# Altium schematic symbol library Robert_.SchLib: 177 symbols (part 2 of 6)
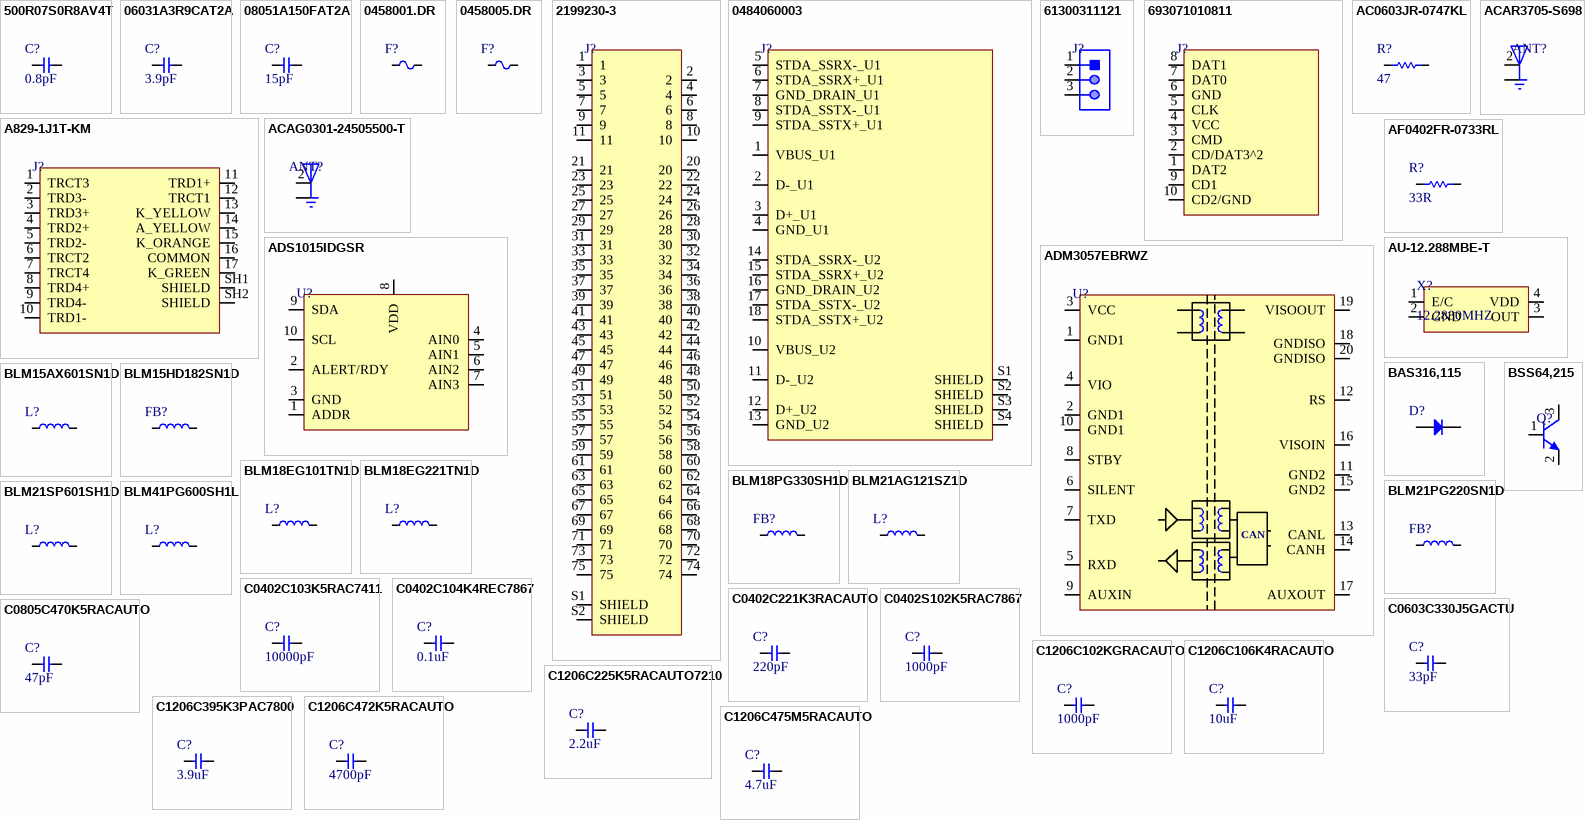
[diagram p7: symbols 500R07S0R8AV4T to C1206C475M5RACAUTO]

## C1206C106K4RACAUTO
designator C?, comment 10uF
CAP CER 10UF 16V X7R 1206; Manufacturer: KEMET; Manufacturer Part Number: C1206C106K4RACAUTO; Supplier: Mouser; Supplier Part Number: 80-C1206C106K4RAUTO; RoHS: Yes; Category: Ceramic Capacitors; Stock: 96894; Pricing: 1=0.45, 10=0.218, 50=0.218, 100=0.141, 1000=0.119, 10000=0.096 (USD); ComponentLink1URL: https://datasheet.ciiva.com/5969/1776110-5969442.pdf?src-supplier=Farnell; ComponentLink1Description: https://datasheet.ciiva.com/5969/1776110-5969442.pdf?src-supplier=Farnell; ComponentLink2URL: https://datasheet.ciiva.com/7729/1776110-7729820.pdf?src-supplier=Element14; ComponentLink2Description: https://datasheet.ciiva.com/7729/1776110-7729820.pdf?src-supplier=Element14; ComponentLink3URL: https://datasheet.ciiva.com/22704/1776110-22704890.pdf?src-supplier=Element14; ComponentLink3Description: https://datasheet.ciiva.com/22704/1776110-22704890.pdf?src-supplier=Element14
footprint Cap-1206 (SMD 1206)
pins: 1, 2

## C1206C225K5RACAUTO7210
designator C?, comment 2.2uF
CAP CER 2.2UF 50V X7R 1206; Manufacturer: KEMET; Manufacturer Part Number: C1206C225K5RACAUTO7210; Supplier: Mouser; Supplier Part Number: 80-C1206C225K5RAUTLR; RoHS: Yes; Category: Ceramic Capacitors; Stock: 62340; Pricing: 1=0.34, 10=0.231, 50=0.231, 100=0.131, 1000=0.081, 10000=0.063 (USD); ComponentLink1URL: https://api.kemet.com/component-edge/download/datasheet/C1206C225K5RACAUTO7210.pdf?src-supplier=Digi-Key; ComponentLink1Description: https://api.kemet.com/component-edge/download/datasheet/C1206C225K5RACAUTO7210.pdf?src-supplier=Digi-Key; ComponentLink2URL: https://datasheet.octopart.com/C1206C225K5RACAUTO7210-KEMET-datasheet-149525492.pdf?src-supplier=Farnell; ComponentLink2Description: https://datasheet.octopart.com/C1206C225K5RACAUTO7210-KEMET-datasheet-149525492.pdf?src-supplier=Farnell
footprint Cap-1206 (SMD 1206)
pins: 1, 2

## C1206C395K3PAC7800
designator C?, comment 3.9uF
CAP CER 3.9UF 25V X5R 1206; Manufacturer: KEMET; Manufacturer Part Number: C1206C395K3PAC7800; Supplier: Digi-Key; Supplier Part Number: 399-C1206C395K3PAC7800CT-ND; RoHS: Yes; Category: Ceramic Capacitors; Stock: 4449; Pricing: 1=0.72, 10=0.532, 50=0.4252, 100=0.3645, 500=0.28856, 1000=0.243 (USD)
footprint Cap-1206 (SMD 1206)
pins: 1, 2

## C1206C472K5RACAUTO
designator C?, comment 4700pF
CAP CER 4700PF 50V X7R 1206; Manufacturer: KEMET; Manufacturer Part Number: C1206C472K5RACAUTO; Supplier: Mouser; Supplier Part Number: 80-C1206C472K5RAUTO; RoHS: Yes; Category: Ceramic Capacitors; Stock: 3869; Pricing: 1=0.18, 10=0.075, 50=0.075, 100=0.044, 1000=0.036, 10000=0.028 (USD); ComponentLink1URL: https://datasheet.ciiva.com/6259/datasheetpn-c1206c472k5racauto-6259849.pdf?src-supplier=Digi-Key; ComponentLink1Description: https://datasheet.ciiva.com/6259/datasheetpn-c1206c472k5racauto-6259849.pdf?src-supplier=Digi-Key
footprint Cap-1206 (SMD 1206)
pins: 1, 2

## C1206C475M5RACAUTO
designator C?, comment 4.7uF
CAP CER 4.7UF 50V X7R 1206; Manufacturer: KEMET; Manufacturer Part Number: C1206C475M5RACAUTO; Supplier: Mouser; Supplier Part Number: 80-C1206C475M5RAUTO; RoHS: Yes; Category: Ceramic Capacitors; Stock: 75276; Pricing: 1=0.63, 10=0.443, 50=0.443, 100=0.292, 1000=0.204, 10000=0.149 (USD)
footprint Cap-1206 (SMD 1206)
pins: 1, 2

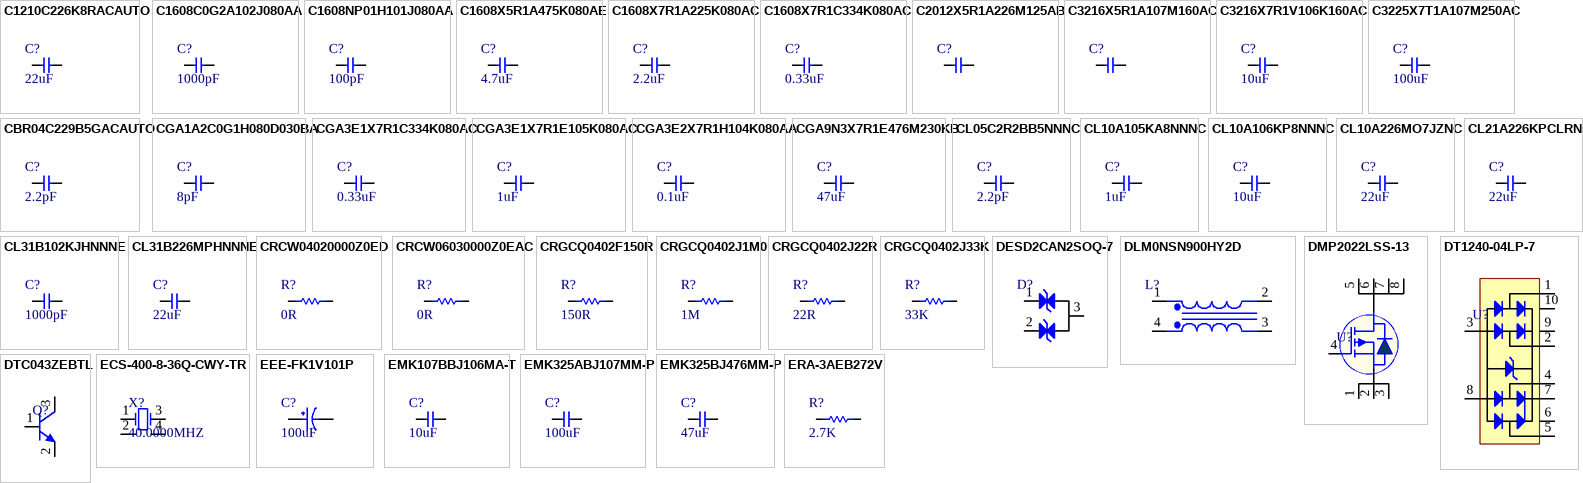
[diagram p1: symbols C1210C226K8RACAUTO to ERA-3AEB272V]

## C1210C226K8RACAUTO
designator C?, comment 22uF
CAP CER 22UF 10V X7R 1210; Manufacturer: KEMET; Manufacturer Part Number: C1210C226K8RACAUTO; Supplier: Mouser; Supplier Part Number: 80-C1210C226K8RAUTO; RoHS: Yes; Category: Ceramic Capacitors; Stock: 25152; Pricing: 1=1.03, 10=0.631, 50=0.631, 100=0.618, 1000=0.412, 10000=0.357 (USD); ComponentLink1URL: http://www.farnell.com/datasheets/2746889.pdf?src-supplier=Farnell; ComponentLink1Description: http://www.farnell.com/datasheets/2746889.pdf?src-supplier=Farnell; ComponentLink2URL: https://datasheet.octopart.com/C1210C226K8RACAUTO-KEMET-datasheet-102159698.pdf?src-supplier=Newark; ComponentLink2Description: https://datasheet.octopart.com/C1210C226K8RACAUTO-KEMET-datasheet-102159698.pdf?src-supplier=Newark; ComponentLink3URL: http://www.farnell.com/datasheets/2746889.pdf?src-supplier=Element14; ComponentLink3Description: http://www.farnell.com/datasheets/2746889.pdf?src-supplier=Element14; ComponentLink4URL: http://www.farnell.com/datasheets/2746889.pdf?src-supplier=Newark; ComponentLink4Description: http://www.farnell.com/datasheets/2746889.pdf?src-supplier=Newark; ComponentLink5URL: https://datasheet.octopart.com/C1210C226K8RACAUTO-KEMET-datasheet-149526349.pdf?src-supplier=Farnell; ComponentLink5Description: https://datasheet.octopart.com/C1210C226K8RACAUTO-KEMET-datasheet-149526349.pdf?src-supplier=Farnell; ComponentLink6URL: https://api.kemet.com/component-edge/download/datasheet/C1210C226K8RACAUTO.pdf?src-supplier=Digi-Key; ComponentLink6Description: https://api.kemet.com/component-edge/download/datasheet/C1210C226K8RACAUTO.pdf?src-supplier=Digi-Key; ComponentLink7URL: http://capacitoredge.kemet.com/capedge2/DataSheet?pn=C1210C226K8RACAUTO&src-supplier=Avnet; ComponentLink7Description: http://capacitoredge.kemet.com/capedge2/DataSheet?pn=C1210C226K8RACAUTO&src-supplier=Avnet; ComponentLink8URL: https://datasheet.octopart.com/C1210C226K8RACAUTO-KEMET-datasheet-130347614.pdf?src-supplier=TME; ComponentLink8Description: https://datasheet.octopart.com/C1210C226K8RACAUTO-KEMET-datasheet-130347614.pdf?src-supplier=TME
footprint Cap-1210 (SMD 1210)
pins: 1, 2

## C1608C0G2A102J080AA
designator C?, comment 1000pF
CAP CER 1000PF 100V C0G 0603; Manufacturer: TDK; Manufacturer Part Number: C1608C0G2A102J080AA; Item Type: Capacitor; Supplier: Rs; Supplier Part Number: 9040183; RoHS: Yes; Category: Ceramic Capacitors; Stock: 300; Pricing: 100=0.033, 500=0.031, 1000=0.029, 2500=0.028, 5000=0.025 (GBP); ComponentLink1URL: https://datasheet.ciiva.com/24217/c1608c0g2a102j080aa-264625-24217039.pdf?src-supplier=Mouser; ComponentLink1Description: https://datasheet.ciiva.com/24217/c1608c0g2a102j080aa-264625-24217039.pdf?src-supplier=Mouser; ComponentLink2URL: https://datasheet.ciiva.com/16498/mid-volt-b11-16498805.pdf?src-supplier=Future+Electronics; ComponentLink2Description: https://datasheet.ciiva.com/16498/mid-volt-b11-16498805.pdf?src-supplier=Future+Electronics
footprint Cap-0603
pins: 1, 2

## C1608NP01H101J080AA
designator C?, comment 100pF
CAP CER 100PF 50V NP0 0603; Manufacturer: TDK; Manufacturer Part Number: C1608NP01H101J080AA; Item Type: Capacitor; Supplier: Arrow Electronics; Supplier Part Number: C1608NP01H101J080AA; RoHS: Yes; Category: Ceramic Capacitors; Stock: 1236; Pricing: 1=0.1172, 10=0.0734, 25=0.0727, 50=0.0628, 100=0.0474, 250=0.0469, 500=0.0388, 1000=0.0313 (USD); ComponentLink1URL: http://www.mouser.com/ds/2/400/tdk_mlcc_commercial_general_en-542463.pdf?src-supplier=Mouser; ComponentLink1Description: http://www.mouser.com/ds/2/400/tdk_mlcc_commercial_general_en-542463.pdf?src-supplier=Mouser; ComponentLink2URL: https://datasheet.octopart.com/C1608NP01H101J080AA-TDK-datasheet-43914282.pdf?src-supplier=Future+Electronics; ComponentLink2Description: https://datasheet.octopart.com/C1608NP01H101J080AA-TDK-datasheet-43914282.pdf?src-supplier=Future+Electronics; ComponentLink3URL: https://product.tdk.com/info/en/catalog/datasheets/mlcc_commercial_hightemp_en.pdf?ref_disty=digikey&src-supplier=Digi-Key; ComponentLink3Description: https://product.tdk.com/info/en/catalog/datasheets/mlcc_commercial_hightemp_en.pdf?ref_disty=digikey&src-supplier=Digi-Key; ComponentLink4URL: https://product.tdk.com/info/en/documents/chara_sheet/C1608NP01H101J080AA.pdf?src-supplier=Digi-Key; ComponentLink4Description: https://product.tdk.com/info/en/documents/chara_sheet/C1608NP01H101J080AA.pdf?src-supplier=Digi-Key; ComponentLink5URL: http://product.tdk.com/en/catalog/datasheets/mlcc_commercial_hightemp_en.pdf?src-supplier=Avnet; ComponentLink5Description: http://product.tdk.com/en/catalog/datasheets/mlcc_commercial_hightemp_en.pdf?src-supplier=Avnet
footprint Cap-0603
pins: 1, 2

## C1608X5R1A475K080AE
designator C?, comment 4.7uF
CAP CER 4.7UF 10V X5R 0603; Manufacturer: TDK; Manufacturer Part Number: C1608X5R1A475K080AE; Item Type: Capacitor; Supplier: Arrow Electronics; Supplier Part Number: C1608X5R1A475K080AE; RoHS: Yes; Category: Ceramic Capacitors; Stock: 1894; Pricing: 1=0.1954, 10=0.1074, 25=0.1063, 50=0.1053, 100=0.0737, 250=0.073, 500=0.0723, 1000=0.0631 (USD); ComponentLink1URL: https://product.tdk.com/info/en/catalog/datasheets/mlcc_commercial_soft_en.pdf?src-supplier=Digi-Key; ComponentLink1Description: https://product.tdk.com/info/en/catalog/datasheets/mlcc_commercial_soft_en.pdf?src-supplier=Digi-Key; ComponentLink2URL: https://product.tdk.com/info/en/catalog/datasheets/mlcc_commercial_soft_en.pdf?ref_disty=digikey&src-supplier=Digi-Key; ComponentLink2Description: https://product.tdk.com/info/en/catalog/datasheets/mlcc_commercial_soft_en.pdf?ref_disty=digikey&src-supplier=Digi-Key; ComponentLink3URL: https://product.tdk.com/info/en/catalog/spec/mlccspec_commercial_soft_en.pdf?src-supplier=Digi-Key; ComponentLink3Description: https://product.tdk.com/info/en/catalog/spec/mlccspec_commercial_soft_en.pdf?src-supplier=Digi-Key; ComponentLink4URL: https://datasheet.octopart.com/C1608X5R1A475K080AE-TDK-datasheet-60278151.pdf?src-supplier=Future+Electronics; ComponentLink4Description: https://datasheet.octopart.com/C1608X5R1A475K080AE-TDK-datasheet-60278151.pdf?src-supplier=Future+Electronics; ComponentLink5URL: https://datasheet.octopart.com/C1608X5R1A475K080AE-TDK-datasheet-159617022.pdf?src-supplier=TME; ComponentLink5Description: https://datasheet.octopart.com/C1608X5R1A475K080AE-TDK-datasheet-159617022.pdf?src-supplier=TME
footprint Cap-0603
pins: 1, 2

## C1608X7R1A225K080AC
designator C?, comment 2.2uF
CAP CER 2.2UF 10V X7R 0603; Manufacturer: TDK; Manufacturer Part Number: C1608X7R1A225K080AC; Dielectric Material: Ceramic; Tolerance: 10%; Item type: Capacitor; Supplier: Rs; Supplier Part Number: 9040237; RoHS: Yes; Category: Ceramic Capacitors; Stock: 4700; Pricing: 50=0.061, 250=0.052, 500=0.043, 1000=0.04, 2000=0.036 (GBP); Mounting Technology: Surface Mount; Case/Package: 0603; Case Code (Metric): 1608; Case Code (Imperial): 0603; Weight: 7.1E-05oz; Min Operating Temperature: -55°C; Max Operating Temperature: 125°C; Packaging: Tape and Reel; Value: 2.2uF; Dielectric: X7R; Construction: Flat; Voltage Rating: 10V; Voltage Rating (DC): 10V; Series: C; Package Quantity: 4000; Termination: SMD/SMT; Length: 1.6mm; Width: 0.8mm; Height: 0.8mm; Depth: 0.8mm; Lead Free: Lead Free; Reach SVHC Compliant: No; RoHS Compliant: Yes; ComponentLink1URL: https://datasheet.ciiva.com/24216/c1608x7r1a225k080ac-264808-24216485.pdf?src-supplier=Mouser; ComponentLink1Description: https://datasheet.ciiva.com/24216/c1608x7r1a225k080ac-264808-24216485.pdf?src-supplier=Mouser; ComponentLink2URL: https://datasheet.ciiva.com/22718/1796654-22718012.pdf?src-supplier=Element14; ComponentLink2Description: https://datasheet.ciiva.com/22718/1796654-22718012.pdf?src-supplier=Element14; ComponentLink3URL: https://datasheet.ciiva.com/6290/tdkmlcccaprange-6290821.pdf?src-supplier=Digi-Key; ComponentLink3Description: https://datasheet.ciiva.com/6290/tdkmlcccaprange-6290821.pdf?src-supplier=Digi-Key; ComponentLink4URL: https://datasheet.ciiva.com/6290/tdkmlcccaprange-6290824.pdf?src-supplier=Digi-Key; ComponentLink4Description: https://datasheet.ciiva.com/6290/tdkmlcccaprange-6290824.pdf?src-supplier=Digi-Key; ComponentLink5URL: https://datasheet.ciiva.com/23802/1796654-23802775.pdf?src-supplier=Newark; ComponentLink5Description: https://datasheet.ciiva.com/23802/1796654-23802775.pdf?src-supplier=Newark; ComponentLink6URL: https://datasheet.ciiva.com/28451/1796654-28451240.pdf?src-supplier=Element14; ComponentLink6Description: https://datasheet.ciiva.com/28451/1796654-28451240.pdf?src-supplier=Element14; ComponentLink7URL: https://datasheet.ciiva.com/22725/1913358-22725529.pdf?src-supplier=Element14; ComponentLink7Description: https://datasheet.ciiva.com/22725/1913358-22725529.pdf?src-supplier=Element14
footprint Cap-0603
pins: 1, 2

## C1608X7R1C334K080AC
designator C?, comment 0.33uF
CAP CER 0.33UF 16V X7R 0603; Manufacturer: TDK; Manufacturer Part Number: C1608X7R1C334K080AC; Item Type: Capacitor; Supplier: Future Electronics; Supplier Part Number: 6011009; RoHS: Yes; Category: Ceramic Capacitors; Stock: 8000; Pricing: 4000=0.014, 12000=0.0135, 40000=0.013, 80000=0.0127, 160000=0.0122 (USD); ComponentLink1URL: https://datasheet.ciiva.com/26834/getdatasheetpartid-746282-26834377.pdf?src-supplier=Verical; ComponentLink1Description: https://datasheet.ciiva.com/26834/getdatasheetpartid-746282-26834377.pdf?src-supplier=Verical; ComponentLink2URL: https://datasheet.ciiva.com/16493/general-b11-16493759.pdf?src-supplier=Future+Electronics; ComponentLink2Description: https://datasheet.ciiva.com/16493/general-b11-16493759.pdf?src-supplier=Future+Electronics; ComponentLink3URL: https://datasheet.ciiva.com/28451/1796654-28451272.pdf?src-supplier=Element14; ComponentLink3Description: https://datasheet.ciiva.com/28451/1796654-28451272.pdf?src-supplier=Element14; ComponentLink4URL: https://datasheet.ciiva.com/22718/1796654-22718014.pdf?src-supplier=Element14; ComponentLink4Description: https://datasheet.ciiva.com/22718/1796654-22718014.pdf?src-supplier=Element14; ComponentLink5URL: https://datasheet.ciiva.com/6292/tdkmlcccaprange-6292475.pdf?src-supplier=Digi-Key; ComponentLink5Description: https://datasheet.ciiva.com/6292/tdkmlcccaprange-6292475.pdf?src-supplier=Digi-Key; ComponentLink6URL: https://datasheet.ciiva.com/6292/tdkmlcccaprange-6292477.pdf?src-supplier=Digi-Key; ComponentLink6Description: https://datasheet.ciiva.com/6292/tdkmlcccaprange-6292477.pdf?src-supplier=Digi-Key; ComponentLink7URL: https://datasheet.ciiva.com/6292/tdkmlcccaprange-6292479.pdf?src-supplier=Digi-Key; ComponentLink7Description: https://datasheet.ciiva.com/6292/tdkmlcccaprange-6292479.pdf?src-supplier=Digi-Key
footprint Cap-0603
pins: 1, 2

## C2012X5R1A226M125AB
designator C?
CAP CER 22UF 10V X5R 0805; Manufacturer: TDK; Manufacturer Part Number: C2012X5R1A226M125AB; Dielectric Material: Ceramic; Tolerance: 20%; Item Type: Capacitor; Supplier: Rs; Supplier Part Number: 9159265; RoHS: Yes; Category: Ceramic Capacitors; Stock: 2720; Pricing: 20=0.186, 100=0.121, 200=0.112, 500=0.103, 1000=0.093 (GBP); Mounting Technology: Surface Mount; Case/Package: 0805; Pins: 2; Case Code (Metric): 2012; Case Code (Imperial): 0805; Weight: 0.000194oz; Min Operating Temperature: -55°C; Max Operating Temperature: 85°C; Voltage Rating (DC): 10V; Packaging: Tape and Reel; Value: 22uF; Dielectric: X5R; Construction: Flat; Package Quantity: 1; Voltage Rating: 10V; Termination: SMD/SMT; Series: C; Length: 2mm; Width: 0.049inch; Height: 1.25mm; Depth: 1.25mm; Thickness: 0.057inch; Lead Free: Lead Free; RoHS Compliant: Yes; Reach SVHC Compliant: Unknown; ComponentLink1URL: https://datasheet.ciiva.com/24216/c2012x5r1a226m125ab-264884-24216051.pdf?src-supplier=Mouser; ComponentLink1Description: https://datasheet.ciiva.com/24216/c2012x5r1a226m125ab-264884-24216051.pdf?src-supplier=Mouser; ComponentLink2URL: https://datasheet.ciiva.com/6287/tdkmlcccaprange-6287852.pdf?src-supplier=Digi-Key; ComponentLink2Description: https://datasheet.ciiva.com/6287/tdkmlcccaprange-6287852.pdf?src-supplier=Digi-Key; ComponentLink3URL: https://datasheet.ciiva.com/6287/tdkmlcccaprange-6287847.pdf?src-supplier=Digi-Key; ComponentLink3Description: https://datasheet.ciiva.com/6287/tdkmlcccaprange-6287847.pdf?src-supplier=Digi-Key; ComponentLink4URL: https://datasheet.ciiva.com/23803/1796654-23803018.pdf?src-supplier=Newark; ComponentLink4Description: https://datasheet.ciiva.com/23803/1796654-23803018.pdf?src-supplier=Newark; ComponentLink5URL: https://datasheet.ciiva.com/16384/general-b11-16384554.pdf?src-supplier=Future+Electronics; ComponentLink5Description: https://datasheet.ciiva.com/16384/general-b11-16384554.pdf?src-supplier=Future+Electronics
footprint Cap-0805 (SMD 0805)
pins: 1, 2

## C3216X5R1A107M160AC
designator C?
CAP CER 100UF 10V X5R 1206; Manufacturer: TDK; Manufacturer Part Number: C3216X5R1A107M160AC; Dielectric Material: Ceramic; Tolerance: 20%; Item Type: Capacitor; Supplier: Rs; Supplier Part Number: 7883057P; RoHS: Yes; Category: Ceramic Capacitors; Stock: 81920; Pricing: 50=0.708, 100=0.656, 250=0.606, 500=0.556 (GBP); Mounting Technology: Surface Mount; Case/Package: 1206; Case Code (Imperial): 1206; Case Code (Metric): 3216; Weight: 0.000571oz; Min Operating Temperature: -55°C; Max Operating Temperature: 85°C; Value: 100uF; Voltage Rating: 10V; Voltage Rating (DC): 10V; Packaging: Tape and Reel; Package Quantity: 1; Dielectric: X5R; Termination: SMD/SMT; Voltage: 10V; Series: C; Construction: Flat; Length: 3.2mm; Width: 0.063inch; Height: 1.6mm; Thickness: 0.075inch; Depth: 1.6mm; Reach SVHC Compliant: No; Lead Free: Lead Free; RoHS Compliant: Yes; ComponentLink1URL: https://datasheet.ciiva.com/24216/c3216x5r1a107m160ac-265050-24216592.pdf?src-supplier=Mouser; ComponentLink1Description: https://datasheet.ciiva.com/24216/c3216x5r1a107m160ac-265050-24216592.pdf?src-supplier=Mouser; ComponentLink2URL: https://datasheet.ciiva.com/7975/1796654-7975125.pdf?src-supplier=Element14; ComponentLink2Description: https://datasheet.ciiva.com/7975/1796654-7975125.pdf?src-supplier=Element14; ComponentLink3URL: https://datasheet.ciiva.com/22694/1796654-22694157.pdf?src-supplier=Element14; ComponentLink3Description: https://datasheet.ciiva.com/22694/1796654-22694157.pdf?src-supplier=Element14; ComponentLink4URL: https://datasheet.ciiva.com/22725/1913358-22725579.pdf?src-supplier=Element14; ComponentLink4Description: https://datasheet.ciiva.com/22725/1913358-22725579.pdf?src-supplier=Element14; ComponentLink5URL: https://datasheet.ciiva.com/28620/mlcc-commercial-general-en-28620362.pdf?src-supplier=Element14; ComponentLink5Description: https://datasheet.ciiva.com/28620/mlcc-commercial-general-en-28620362.pdf?src-supplier=Element14; ComponentLink6URL: https://datasheet.ciiva.com/6284/tdkmlcccaprange-6284586.pdf?src-supplier=Digi-Key; ComponentLink6Description: https://datasheet.ciiva.com/6284/tdkmlcccaprange-6284586.pdf?src-supplier=Digi-Key; ComponentLink7URL: https://datasheet.ciiva.com/6284/tdkmlcccaprange-6284584.pdf?src-supplier=Digi-Key; ComponentLink7Description: https://datasheet.ciiva.com/6284/tdkmlcccaprange-6284584.pdf?src-supplier=Digi-Key; ComponentLink8URL: https://datasheet.ciiva.com/6284/tdkmlcccaprange-6284588.pdf?src-supplier=Digi-Key; ComponentLink8Description: https://datasheet.ciiva.com/6284/tdkmlcccaprange-6284588.pdf?src-supplier=Digi-Key; ComponentLink9URL: https://datasheet.ciiva.com/16482/e412-c-16482549.pdf?src-supplier=Future+Electronics; ComponentLink9Description: https://datasheet.ciiva.com/16482/e412-c-16482549.pdf?src-supplier=Future+Electronics; ComponentLink10URL: https://datasheet.ciiva.com/48671/e412-c-48671366.pdf?src-supplier=Avnet; ComponentLink10Description: https://datasheet.ciiva.com/48671/e412-c-48671366.pdf?src-supplier=Avnet
footprint Cap-1206 (SMD 1206)
pins: 1, 2

## C3216X7R1V106K160AC
designator C?, comment 10uF
CAP CER 10UF 35V X7R 1206; Manufacturer: TDK; Manufacturer Part Number: C3216X7R1V106K160AC; Item Type: Capacitor; Supplier: Rs; Supplier Part Number: 9162964; RoHS: Yes; Category: Ceramic Capacitors; Stock: 40; Pricing: 10=0.37, 100=0.324, 250=0.278, 500=0.231, 1000=0.185 (GBP); ComponentLink1URL: https://datasheet.ciiva.com/14905/tdkmlcccaprange-14905260.pdf?src-supplier=Digi-Key; ComponentLink1Description: https://datasheet.ciiva.com/14905/tdkmlcccaprange-14905260.pdf?src-supplier=Digi-Key; ComponentLink2URL: https://datasheet.ciiva.com/14905/tdkmlcccaprange-14905261.pdf?src-supplier=Digi-Key; ComponentLink2Description: https://datasheet.ciiva.com/14905/tdkmlcccaprange-14905261.pdf?src-supplier=Digi-Key; ComponentLink3URL: https://datasheet.ciiva.com/14905/tdkmlcccaprange-14905263.pdf?src-supplier=Digi-Key; ComponentLink3Description: https://datasheet.ciiva.com/14905/tdkmlcccaprange-14905263.pdf?src-supplier=Digi-Key
footprint Cap-1206 (SMD 1206)
pins: 1, 2

## C3225X7T1A107M250AC
designator C?, comment 100uF
CAP CER 100UF 10V X7T 1210; Manufacturer: TDK; Manufacturer Part Number: C3225X7T1A107M250AC; Supplier: Digi-Key; Supplier Part Number: 445-C3225X7T1A107M250ACCT-ND; RoHS: Yes; Category: Ceramic Capacitors; Stock: 654; Pricing: 1=1.75, 10=1.385, 50=1.2004, 100=1.0388, 500=0.78484 (USD)
footprint Cap-1210 (SMD 1210)
pins: 1, 2

## CBR04C229B5GACAUTO
designator C?, comment 2.2pF
CAP CER 2.2PF 50V C0G/NP0 0402; Manufacturer: KEMET; Manufacturer Part Number: CBR04C229B5GACAUTO; Supplier: Mouser; Supplier Part Number: 80-CBR04C229B5GAUTO; RoHS: No; Stock: 8250; Pricing: 1=0.16, 10=0.066, 50=0.066, 100=0.039, 1000=0.034, 10000=0.026 (USD)
footprint Cap-0402
pins: 1, 2

## CGA1A2C0G1H080D030BA
designator C?, comment 8pF
CAP CER 8PF 50V C0G 0201; Manufacturer: TDK; Manufacturer Part Number: CGA1A2C0G1H080D030BA; Material: 4241ConductorMaterial; Temperature Coefficient: 30ppm/°C; Supplier: Digi-Key; Supplier Part Number: 445-12057-1-ND; RoHS: Yes; Category: Ceramic Capacitors; Stock: 40913; Pricing: 1=0.11, 10=0.078, 50=0.0424, 100=0.0346, 500=0.02474, 1000=0.01944, 2500=0.01768, 5000=0.01626 (USD); Mounting Technology: Surface Mount; Case/Package: 0201; Case Code (Metric): 0603; Case Code (Imperial): 0201; Weight: 6E-06oz; Min Operating Temperature: -55°C; Max Operating Temperature: 125°C; Package Quantity: 15000; Packaging: Tape and Reel; Value: 8pF; Voltage Rating: 50V; Voltage Rating (DC): 50V; Dielectric: C0G; Termination: SMD/SMT; Series: CGA; Length: 0.6mm; Width: 0.3mm; Height: 0.3mm; Ratings: AEC-Q200; RoHS Compliant: Yes; ComponentLink1URL: https://datasheet.ciiva.com/24221/mlcc-automotive-general-en-24221484.pdf?src-supplier=Mouser; ComponentLink1Description: https://datasheet.ciiva.com/24221/mlcc-automotive-general-en-24221484.pdf?src-supplier=Mouser
footprint CAP-0201
pins: 1, 2

## CGA3E1X7R1C334K080AC
designator C?, comment 0.33uF
CAP CER 0.33UF 16V X7R 0603; Manufacturer: TDK; Manufacturer Part Number: CGA3E1X7R1C334K080AC; Material: 4241ConductorMaterial; Supplier: Avnet; Supplier Part Number: 52W9636; RoHS: Yes; Category: Ceramic Capacitors; Stock: 4000; Pricing: 1=0.023 (USD); ComponentLink1URL: https://datasheet.ciiva.com/26834/getdatasheetpartid-734961-26834531.pdf?src-supplier=Verical; ComponentLink1Description: https://datasheet.ciiva.com/26834/getdatasheetpartid-734961-26834531.pdf?src-supplier=Verical; ComponentLink2URL: https://datasheet.ciiva.com/24217/cga3e1x7r1c334k080ac-265890-24217429.pdf?src-supplier=Mouser; ComponentLink2Description: https://datasheet.ciiva.com/24217/cga3e1x7r1c334k080ac-265890-24217429.pdf?src-supplier=Mouser; ComponentLink3URL: https://datasheet.ciiva.com/7975/1807242-7975343.pdf?src-supplier=Element14; ComponentLink3Description: https://datasheet.ciiva.com/7975/1807242-7975343.pdf?src-supplier=Element14
footprint Cap-0603
pins: 1, 2

## CGA3E1X7R1E105K080AC
designator C?, comment 1uF
CAP CER 1UF 25V X7R 0603; Manufacturer: TDK; Manufacturer Part Number: CGA3E1X7R1E105K080AC; Material: 4241ConductorMaterial; Tolerance: 10%; Supplier: Rs; Supplier Part Number: 7882925P; RoHS: Yes; Category: Ceramic Capacitors; Stock: 80700; Pricing: 800=0.027, 2000=0.026 (GBP); Mounting Technology: Surface Mount; Case/Package: 0603; Case Code (Metric): 1608; Case Code (Imperial): 0603; Weight: 7.1E-05oz; Min Operating Temperature: -55°C; Max Operating Temperature: 125°C; Value: 1uF; Packaging: Tape and Reel; Dielectric: X7R; Voltage Rating: 25V; Package Quantity: 1; Voltage Rating (DC): 25V; Termination: SMD/SMT; Voltage: 25V; Series: CGA; Length: 1.6mm; Width: 0.031inch; Height: 0.8mm; Depth: 0.8mm; Thickness: 0.035inch; Ratings: AEC-Q200; Lead Free: Lead Free; Reach SVHC Compliant: No; RoHS Compliant: Yes; ComponentLink1URL: https://datasheet.ciiva.com/24216/cga3e1x7r1e105k080ac-265757-24216362.pdf?src-supplier=Mouser; ComponentLink1Description: https://datasheet.ciiva.com/24216/cga3e1x7r1e105k080ac-265757-24216362.pdf?src-supplier=Mouser; ComponentLink2URL: https://datasheet.ciiva.com/23803/1936565-23803078.pdf?src-supplier=Newark; ComponentLink2Description: https://datasheet.ciiva.com/23803/1936565-23803078.pdf?src-supplier=Newark; ComponentLink3URL: https://datasheet.ciiva.com/46385/1735392-46385705.pdf?src-supplier=Element14; ComponentLink3Description: https://datasheet.ciiva.com/46385/1735392-46385705.pdf?src-supplier=Element14; ComponentLink4URL: https://datasheet.ciiva.com/48573/2288cga3e1x7r1e105k080ac-48573708.pdf?src-supplier=Onlinecomponents.com; ComponentLink4Description: https://datasheet.ciiva.com/48573/2288cga3e1x7r1e105k080ac-48573708.pdf?src-supplier=Onlinecomponents.com; ComponentLink5URL: https://datasheet.ciiva.com/16428/mlccspec-automotive-general-midvoltage-en-16428542.pdf?src-supplier=Future+Electronics; ComponentLink5Description: https://datasheet.ciiva.com/16428/mlccspec-automotive-general-midvoltage-en-16428542.pdf?src-supplier=Future+Electronics
footprint Cap-0603
pins: 1, 2

## CGA3E2X7R1H104K080AA
designator C?, comment 0.1uF
CAP CER 0.1UF 50V X7R 0603; Manufacturer: TDK; Manufacturer Part Number: CGA3E2X7R1H104K080AA; Material: 4241ConductorMaterial; Value: 100nF; Tolerance: 10%; Supplier: Rs; Supplier Part Number: 7882985P; RoHS: Yes; Category: Ceramic Capacitors; Stock: 235650; Pricing: 250=0.037, 500=0.034, 1000=0.033, 2500=0.029 (GBP); Mounting Technology: Surface Mount; Case/Package: 0603; Case Code (Imperial): 0603; Case Code (Metric): 1608; Weight: 7.1E-05oz; Min Operating Temperature: -55°C; Max Operating Temperature: 125°C; Packaging: Tape and Reel; Dielectric: X7R; Voltage Rating (DC): 50V; Package Quantity: 1; Voltage Rating: 50V; Termination: SMD/SMT; Voltage: 50V; Series: CGA; Length: 1.6mm; Width: 0.031inch; Height: 0.8mm; Depth: 0.8mm; Thickness: 0.035inch; Ratings: AEC-Q200; Radiation Hardening: No; Lead Free: Lead Free; RoHS Compliant: Yes; Reach SVHC Compliant: No; ComponentLink1URL: https://datasheet.ciiva.com/24216/cga3e2x7r1h104k080aa-266291-24216208.pdf?src-supplier=Mouser; ComponentLink1Description: https://datasheet.ciiva.com/24216/cga3e2x7r1h104k080aa-266291-24216208.pdf?src-supplier=Mouser; ComponentLink2URL: https://datasheet.ciiva.com/15192/getdatasheetpartid-715867-15192412.pdf?src-supplier=Verical; ComponentLink2Description: https://datasheet.ciiva.com/15192/getdatasheetpartid-715867-15192412.pdf?src-supplier=Verical; ComponentLink3URL: https://datasheet.ciiva.com/22725/1735392-22725642.pdf?src-supplier=Element14; ComponentLink3Description: https://datasheet.ciiva.com/22725/1735392-22725642.pdf?src-supplier=Element14; ComponentLink4URL: https://datasheet.ciiva.com/46385/1735392-46385708.pdf?src-supplier=Element14; ComponentLink4Description: https://datasheet.ciiva.com/46385/1735392-46385708.pdf?src-supplier=Element14; ComponentLink5URL: https://datasheet.ciiva.com/23803/1936565-23803084.pdf?src-supplier=Newark; ComponentLink5Description: https://datasheet.ciiva.com/23803/1936565-23803084.pdf?src-supplier=Newark; ComponentLink6URL: https://datasheet.ciiva.com/16500/mlccspec-automotive-general-midvoltage-en-16500693.pdf?src-supplier=Future+Electronics; ComponentLink6Description: https://datasheet.ciiva.com/16500/mlccspec-automotive-general-midvoltage-en-16500693.pdf?src-supplier=Future+Electronics
footprint Cap-0603
pins: 1, 2

## CGA9N3X7R1E476M230KB
designator C?, comment 47uF
CAP CER 47UF 25V X7R 2220; Manufacturer: TDK; Manufacturer Part Number: CGA9N3X7R1E476M230KB; Material: 4241ConductorMaterial; Tolerance: 20%; Supplier: Rs; Supplier Part Number: 2427522; RoHS: Yes; Category: Ceramic Capacitors; Stock: 467; Pricing: 1=3.07, 5=2.92, 10=2.76, 20=2.46, 100=2 (GBP); Mounting Technology: Surface Mount; Case/Package: 2220; Case Code (Imperial): 2220; Case Code (Metric): 5750; Min Operating Temperature: -55°C; Max Operating Temperature: 125°C; Packaging: Cut Tape; Value: 47uF; Voltage Rating: 25V; Series: CGA; Length: 5.7mm; Width: 5mm; Height: 2.8mm; Ratings: AEC-Q200; RoHS Compliant: Yes; ComponentLink1URL: https://product.tdk.com/info/en/catalog/spec/mlccspec_automotive_general_midvoltage_en.pdf?src-supplier=Digi-Key; ComponentLink1Description: https://product.tdk.com/info/en/catalog/spec/mlccspec_automotive_general_midvoltage_en.pdf?src-supplier=Digi-Key; ComponentLink2URL: https://product.tdk.com/info/en/catalog/datasheets/mlcc_automotive_general_en.pdf?src-supplier=Digi-Key; ComponentLink2Description: https://product.tdk.com/info/en/catalog/datasheets/mlcc_automotive_general_en.pdf?src-supplier=Digi-Key; ComponentLink3URL: https://product.tdk.com/info/en/catalog/datasheets/mlcc_automotive_general_en.pdf?ref_disty=digikey&src-supplier=Digi-Key; ComponentLink3Description: https://product.tdk.com/info/en/catalog/datasheets/mlcc_automotive_general_en.pdf?ref_disty=digikey&src-supplier=Digi-Key; ComponentLink4URL: https://datasheet.octopart.com/CGA9N3X7R1E476M230KB-TDK-datasheet-43366117.pdf?src-supplier=Future+Electronics; ComponentLink4Description: https://datasheet.octopart.com/CGA9N3X7R1E476M230KB-TDK-datasheet-43366117.pdf?src-supplier=Future+Electronics
footprint Cap 2220
pins: 1, 2

## CL05C2R2BB5NNNC
designator C?, comment 2.2pF
CAP CER 2.2PF 50V C0G/NP0 0402; Manufacturer: Samsung; Manufacturer Part Number: CL05C2R2BB5NNNC; Item Type: Capacitor; Supplier: Arrow Electronics; Supplier Part Number: CL05C2R2BB5NNNC; RoHS: Yes; Category: Ceramic Capacitors; Stock: 5470000; Pricing: 10000=0.265, 20000=0.2623, 30000=0.2597, 50000=0.257, 100000=0.2545, 150000=0.2518 (USD); ComponentLink1URL: https://datasheet.ciiva.com/15195/getdatasheetpartid-502280-15195684.pdf?src-supplier=Verical; ComponentLink1Description: https://datasheet.ciiva.com/15195/getdatasheetpartid-502280-15195684.pdf?src-supplier=Verical; ComponentLink2URL: https://datasheet.ciiva.com/26310/mlcc-catalogdownload2013-eng-26310348.pdf?src-supplier=Distrelec; ComponentLink2Description: https://datasheet.ciiva.com/26310/mlcc-catalogdownload2013-eng-26310348.pdf?src-supplier=Distrelec
footprint Cap-0402
pins: 1, 2

## CL10A105KA8NNNC
designator C?, comment 1uF
CAP CER 1UF 25V X5R 0603; Manufacturer: Samsung; Manufacturer Part Number: CL10A105KA8NNNC; Tolerance: 10%; Item Type: Capacitor; Supplier: Rs; Supplier Part Number: 7664838; RoHS: Yes; Category: Ceramic Capacitors; Stock: 32000; Pricing: 4000=0.006, 12000=0.006, 20000=0.005, 40000=0.005, 100000=0.005 (GBP); Mounting Technology: Surface Mount; Case/Package: 0603; Case Code (Metric): 1608; Case Code (Imperial): 0603; Min Operating Temperature: -55°C; Max Operating Temperature: 85°C; Value: 1uF; Voltage Rating (DC): 25V; Series: CL; Packaging: Tape and Reel; Voltage Rating: 25V; Length: 0.063inch; Width: 0.031inch; Thickness: 0.035inch; Lead Free: Lead Free; RoHS Compliant: Yes; ComponentLink1URL: https://datasheet.ciiva.com/25801/cl10a105ka8nnnc-25801364.pdf?src-supplier=Digi-Key; ComponentLink1Description: https://datasheet.ciiva.com/25801/cl10a105ka8nnnc-25801364.pdf?src-supplier=Digi-Key; ComponentLink2URL: https://datasheet.ciiva.com/29198/458162-da-01-en-vs-kondensator-0603-29198475.pdf?src-supplier=Conrad; ComponentLink2Description: https://datasheet.ciiva.com/29198/458162-da-01-en-vs-kondensator-0603-29198475.pdf?src-supplier=Conrad
footprint Cap-0603
pins: 1, 2

## CL10A106KP8NNNC
designator C?, comment 10uF
CAP CER 10UF 10V X5R 0603; Manufacturer: Samsung; Manufacturer Part Number: CL10A106KP8NNNC; Material: Ceramic; Tolerance: 10%; Item Type: Capacitor; Supplier: Avnet; Supplier Part Number: CL10A106KP8NNNC; RoHS: Yes; Category: Ceramic Capacitors; Stock: 168000; Pricing: 4000=0.01705 (USD); Mounting Technology: Surface Mount; Case/Package: 0603; Case Code (Metric): 1608; Case Code (Imperial): 0603; Min Operating Temperature: -55°C; Max Operating Temperature: 85°C; Value: 10uF; Dielectric: X5R; Package Quantity: 1; Packaging: Tape and Reel; Voltage Rating: 10V; Voltage Rating (DC): 10V; Series: CL; Construction: Flat; Length: 1.6mm; Width: 0.031inch; Height: 0.8mm; Thickness: 0.035inch; Depth: 0.8mm; Radiation Hardening: No; Lead Free: Lead Free; RoHS Compliant: Yes; ComponentLink1URL: https://datasheet.ciiva.com/26877/getdatasheetpartid-359551-26877881.pdf?src-supplier=Verical; ComponentLink1Description: https://datasheet.ciiva.com/26877/getdatasheetpartid-359551-26877881.pdf?src-supplier=Verical; ComponentLink2URL: https://datasheet.ciiva.com/29198/457369-da-01-en-vs-kondensator-0603-29198790.pdf?src-supplier=Conrad; ComponentLink2Description: https://datasheet.ciiva.com/29198/457369-da-01-en-vs-kondensator-0603-29198790.pdf?src-supplier=Conrad; ComponentLink3URL: https://datasheet.ciiva.com/16200/cl05b104kq5nnnc-16200766.pdf?src-supplier=Future+Electronics; ComponentLink3Description: https://datasheet.ciiva.com/16200/cl05b104kq5nnnc-16200766.pdf?src-supplier=Future+Electronics
footprint Cap-0603
pins: 1, 2

## CL10A226MO7JZNC
designator C?, comment 22uF
CAP CER 22UF 16V X5R 0603; Manufacturer: Samsung; Manufacturer Part Number: CL10A226MO7JZNC; Tolerance: 20%; Supplier: Avnet; Supplier Part Number: CL10A226MO7JZNC; RoHS: Yes; Category: Ceramic Capacitors; Stock: 1192000; Pricing: 4000=0.1372 (USD); Mounting Technology: Surface Mount; Case/Package: 0603; Case Code (Imperial): 0603; Case Code (Metric): 1608; Min Operating Temperature: -55°C; Max Operating Temperature: 85°C; Packaging: Cut Tape; Value: 22uF; Voltage Rating: 16V; Series: CL; RoHS Compliant: Yes; ComponentLink1URL: http://www.samsungsem.com/kr/support/product-search/mlcc/CL10A226MO7JZNC.jsp?src-supplier=Digi-Key; ComponentLink1Description: http://www.samsungsem.com/kr/support/product-search/mlcc/CL10A226MO7JZNC.jsp?src-supplier=Digi-Key; ComponentLink2URL: https://datasheet.octopart.com/CL10A226MO7JZNC-Samsung-Electro-Mechanics-datasheet-149156497.pdf?src-supplier=Future+Electronics; ComponentLink2Description: https://datasheet.octopart.com/CL10A226MO7JZNC-Samsung-Electro-Mechanics-datasheet-149156497.pdf?src-supplier=Future+Electronics
footprint Cap-0603
pins: 1, 2

## CL21A226KPCLRNC
designator C?, comment 22uF
CAP CER 22UF 10V X5R 0805; Manufacturer: Samsung; Manufacturer Part Number: CL21A226KPCLRNC; Tolerance: 10%; Item Type: Capacitor; Supplier: Avnet; Supplier Part Number: CL21A226KPCLRNC; RoHS: Yes; Category: Ceramic Capacitors; Stock: 144000; Pricing: 4000=0.04743 (USD); Mounting Technology: Surface Mount; Case/Package: 0805; Case Code (Metric): 2012; Case Code (Imperial): 0805; Min Operating Temperature: -55°C; Max Operating Temperature: 85°C; Packaging: Tape and Reel; Value: 22uF; Dielectric: X5R; Voltage Rating: 10V; Series: CL; Length: 0.079inch; Width: 0.049inch; Thickness: 0.037inch; Depth: 1.25mm; Radiation Hardening: No; Lead Free: Lead Free; RoHS Compliant: Yes; ComponentLink1URL: https://datasheet.ciiva.com/26936/getdatasheetpartid-781772-26936902.pdf?src-supplier=Verical; ComponentLink1Description: https://datasheet.ciiva.com/26936/getdatasheetpartid-781772-26936902.pdf?src-supplier=Verical
footprint Cap-0805 (SMD 0805)
pins: 1, 2

## CL31B102KJHNNNE
designator C?, comment 1000pF
CAP CER 1000PF 2KV X7R 1206; Manufacturer: Samsung; Manufacturer Part Number: CL31B102KJHNNNE; Value: 1nF; Tolerance: 10%; Voltage: 200V; Item Type: Capacitor; Supplier: Arrow Electronics; Supplier Part Number: CL31B102KJHNNNE; RoHS: Yes; Category: Ceramic Capacitors; Stock: 125192; Pricing: 1=0.3279, 10=0.1547, 25=0.1532, 100=0.0959, 250=0.095, 500=0.09, 1000=0.0734, 3000=0.0687, 6000=0.0643, 15000=0.0565, 30000=0.0502, 75000=0.0468 (USD); Mounting Technology: Surface Mount; Case/Package: 1206; Case Code (Metric): 3216; Case Code (Imperial): 1206; Min Operating Temperature: -55°C; Max Operating Temperature: 125°C; Packaging: Tape and Reel; Package Quantity: 1; Voltage Rating: 2kV; Dielectric: X7R; Series: CL; Construction: Flat; Length: 3.2mm; Width: 0.063inch; Height: 1.6mm; Thickness: 0.071inch; Depth: 1.6mm; Radiation Hardening: No; RoHS Compliant: Yes; ComponentLink1URL: https://datasheet.ciiva.com/25727/cl31b102kjhnnne-25727529.pdf?src-supplier=Digi-Key; ComponentLink1Description: https://datasheet.ciiva.com/25727/cl31b102kjhnnne-25727529.pdf?src-supplier=Digi-Key; ComponentLink2URL: https://datasheet.ciiva.com/26838/getdatasheetpartid-358436-26838883.pdf?src-supplier=Verical; ComponentLink2Description: https://datasheet.ciiva.com/26838/getdatasheetpartid-358436-26838883.pdf?src-supplier=Verical
footprint Cap-1206 (SMD 1206)
pins: 1, 2

## CL31B226MPHNNNE
designator C?, comment 22uF
CAP CER 22UF 10V X7R 1206; Manufacturer: Samsung; Manufacturer Part Number: CL31B226MPHNNNE; Item Type: Capacitor; Supplier: Avnet; Supplier Part Number: CL31B226MPHNNNE; RoHS: Yes; Category: Ceramic Capacitors; Stock: 288000; Pricing: 2000=0.06076 (USD); ComponentLink1URL: https://datasheet.ciiva.com/25792/cl31b226mphnnne-25792003.pdf?src-supplier=Digi-Key; ComponentLink1Description: https://datasheet.ciiva.com/25792/cl31b226mphnnne-25792003.pdf?src-supplier=Digi-Key
footprint Cap-1206 (SMD 1206)
pins: 1, 2

## CRCW04020000Z0ED
designator R?, comment 0R
RES SMD 0 OHM JUMPER 1/16W 0402; Manufacturer: Vishay; Manufacturer Part Number: CRCW04020000Z0ED; Value: 0mR; Voltage Rating: 50V; Max Power Dissipation: 63mW; Temperature Coefficient: 100ppm/°C; Tolerance: 5%; Supplier: Mouser; Supplier Part Number: 71-CRCW0402-0-E3; RoHS: Yes; Category: Chip SMD Resistors; Stock: 2904592; Pricing: 1=0.1, 10=0.017, 50=0.017, 100=0.008, 1000=0.006, 10000=0.004 (USD); Case/Package: 0402; Case Code (Imperial): 0402; Case Code (Metric): 1005; Contact Plating: Tin; Weight: 2.3E-05oz; Min Operating Temperature: -55°C; Max Operating Temperature: 155°C; Packaging: Tape and Reel; Number of Terminations: 2; Series: CRCW; Package Quantity: 10000; Power Rating: 63mW; Resistor Type: Thick Film; Termination: SMD/SMT; Voltage Rating (DC): 50V; Features: Automotive AEC-Q200; Construction: Rectangular; Length: 1mm; Width: 0.5mm; Height: 0.35mm; Depth: 0.5mm; Ratings: AEC-Q200; Radiation Hardening: No; Lead Free: Lead Free; RoHS Compliant: Yes; Reach SVHC Compliant: Unknown; Military Standard: Not; ComponentLink1URL: https://datasheet.ciiva.com/7841/1720486-7841802.pdf?src-supplier=Element14; ComponentLink1Description: https://datasheet.ciiva.com/7841/1720486-7841802.pdf?src-supplier=Element14; ComponentLink2URL: https://datasheet.ciiva.com/26311/fld-crcw-e3-data-en-26311550.pdf?src-supplier=Distrelec; ComponentLink2Description: https://datasheet.ciiva.com/26311/fld-crcw-e3-data-en-26311550.pdf?src-supplier=Distrelec; ComponentLink3URL: https://datasheet.ciiva.com/7841/1697337-7841468.pdf?src-supplier=Element14; ComponentLink3Description: https://datasheet.ciiva.com/7841/1697337-7841468.pdf?src-supplier=Element14; ComponentLink4URL: https://datasheet.ciiva.com/2461/dcrcwe3-2461963.pdf?src-supplier=Digi-Key; ComponentLink4Description: https://datasheet.ciiva.com/2461/dcrcwe3-2461963.pdf?src-supplier=Digi-Key; ComponentLink5URL: https://datasheet.ciiva.com/2461/dcrcwe3-2461964.pdf?src-supplier=Digi-Key; ComponentLink5Description: https://datasheet.ciiva.com/2461/dcrcwe3-2461964.pdf?src-supplier=Digi-Key; ComponentLink6URL: https://datasheet.ciiva.com/2461/dcrcwe3-2461962.pdf?src-supplier=Digi-Key; ComponentLink6Description: https://datasheet.ciiva.com/2461/dcrcwe3-2461962.pdf?src-supplier=Digi-Key; ComponentLink7URL: https://datasheet.ciiva.com/16761/70200976-16761309.pdf?src-supplier=Allied+Electronics; ComponentLink7Description: https://datasheet.ciiva.com/16761/70200976-16761309.pdf?src-supplier=Allied+Electronics; ComponentLink8URL: https://datasheet.ciiva.com/3255/dcrcwe3-3255944.pdf?src-supplier=Avnet; ComponentLink8Description: https://datasheet.ciiva.com/3255/dcrcwe3-3255944.pdf?src-supplier=Avnet
footprint Res-0402
pins: 1, 2

## CRCW06030000Z0EAC
designator R?, comment 0R
RES 0 OHM JUMPER 1/10W 0603; Manufacturer: Vishay; Manufacturer Part Number: CRCW06030000Z0EAC; Power Rating: 100mW; Value: 22R; Voltage Rating: 75V; Supplier: Mouser; Supplier Part Number: 71-CRCW06030000Z0EAC; RoHS: Yes; Category: Chip SMD Resistors; Stock: 1442276; Pricing: 1=0.1, 10=0.013, 50=0.013, 100=0.008, 1000=0.005, 10000=0.004 (USD); Mounting Technology: Surface Mount; Case/Package: Molded; Pins: 2NUMBER; Contact Plating: Tin; Min Operating Temperature: -55°C; Max Operating Temperature: 155°C; Resistor Type: Thick Film; Termination: Wraparound; Length: 1.55mm; Height: 550um; Lead Free: Lead Free; RoHS Compliant: Yes; ComponentLink1URL: https://datasheet.octopart.com/CRCW06030000Z0EAC-Vishay-datasheet-100063072.pdf?src-supplier=Future+Electronics; ComponentLink1Description: https://datasheet.octopart.com/CRCW06030000Z0EAC-Vishay-datasheet-100063072.pdf?src-supplier=Future+Electronics; ComponentLink2URL: http://www.vishay.com/docs/28773/crcwce3.pdf?src-supplier=Digi-Key; ComponentLink2Description: http://www.vishay.com/docs/28773/crcwce3.pdf?src-supplier=Digi-Key
footprint Res-0603
pins: 1, 2

## CRGCQ0402F150R
designator R?, comment 150R
RES 150 OHM 1% 1/16W 0402; Manufacturer: TE Connectivity; Manufacturer Part Number: CRGCQ0402F150R; Supplier: Arrow Electronics; Supplier Part Number: CRGCQ0402F150R; RoHS: Yes; Category: Chip SMD Resistors; Stock: 712; Pricing: 1=0.0975, 10=0.0101, 25=0.01, 100=0.0051, 250=0.005, 500=0.0042 (USD); ComponentLink1URL: http://datasheet.octopart.com/CRGCQ0402F150R-TE-Connectivity-datasheet-114679081.pdf?src-supplier=Verical; ComponentLink1Description: http://datasheet.octopart.com/CRGCQ0402F150R-TE-Connectivity-datasheet-114679081.pdf?src-supplier=Verical; ComponentLink2URL: http://datasheet.octopart.com/CRGCQ0402F150R-TE-Connectivity-datasheet-114679081.pdf?src-supplier=Avnet; ComponentLink2Description: http://datasheet.octopart.com/CRGCQ0402F150R-TE-Connectivity-datasheet-114679081.pdf?src-supplier=Avnet; ComponentLink3URL: http://datasheet.octopart.com/CRGCQ0402F150R-TE-Connectivity-datasheet-114679081.pdf?src-supplier=Newark; ComponentLink3Description: http://datasheet.octopart.com/CRGCQ0402F150R-TE-Connectivity-datasheet-114679081.pdf?src-supplier=Newark; ComponentLink4URL: https://4donline.ihs.com/images/VipMasterIC/IC/TYEL/TYEL-S-A0004929575/TYEL-S-A0004929575-1.pdf?hkey=52A5661711E402568146F3353EA87419&src-supplier=Newark; ComponentLink4Description: https://4donline.ihs.com/images/VipMasterIC/IC/TYEL/TYEL-S-A0004929575/TYEL-S-A0004929575-1.pdf?hkey=52A5661711E402568146F3353EA87419&src-supplier=Newark; ComponentLink5URL: http://datasheet.octopart.com/CRGCQ0402F150R-TE-Connectivity-datasheet-114679081.pdf?src-supplier=Onlinecomponents.com; ComponentLink5Description: http://datasheet.octopart.com/CRGCQ0402F150R-TE-Connectivity-datasheet-114679081.pdf?src-supplier=Onlinecomponents.com; ComponentLink6URL: https://4donline.ihs.com/images/VipMasterIC/IC/TYEL/TYEL-S-A0004929575/TYEL-S-A0004929575-1.pdf?hkey=52A5661711E402568146F3353EA87419&src-supplier=Farnell; ComponentLink6Description: https://4donline.ihs.com/images/VipMasterIC/IC/TYEL/TYEL-S-A0004929575/TYEL-S-A0004929575-1.pdf?hkey=52A5661711E402568146F3353EA87419&src-supplier=Farnell; ComponentLink7URL: http://datasheet.octopart.com/CRGCQ0402F150R-TE-Connectivity-datasheet-114679081.pdf?src-supplier=Mouser; ComponentLink7Description: http://datasheet.octopart.com/CRGCQ0402F150R-TE-Connectivity-datasheet-114679081.pdf?src-supplier=Mouser; ComponentLink8URL: https://www.te.com/commerce/DocumentDelivery/DDEController?Action=srchrtrv&DocNm=1773204-3&DocType=DS&DocLang=English&src-supplier=Digi-Key; ComponentLink8Description: https://www.te.com/commerce/DocumentDelivery/DDEController?Action=srchrtrv&DocNm=1773204-3&DocType=DS&DocLang=English&src-supplier=Digi-Key; ComponentLink9URL: http://datasheet.octopart.com/CRGCQ0402F150R-TE-Connectivity-datasheet-114679081.pdf?src-supplier=Digi-Key; ComponentLink9Description: http://datasheet.octopart.com/CRGCQ0402F150R-TE-Connectivity-datasheet-114679081.pdf?src-supplier=Digi-Key; ComponentLink10URL: http://datasheet.octopart.com/CRGCQ0402F150R-TE-Connectivity-datasheet-114679081.pdf?src-supplier=Heilind+Electronics; ComponentLink10Description: http://datasheet.octopart.com/CRGCQ0402F150R-TE-Connectivity-datasheet-114679081.pdf?src-supplier=Heilind+Electronics; ComponentLink11URL: http://datasheet.octopart.com/CRGCQ0402F150R-TE-Connectivity-datasheet-114679081.pdf?src-supplier=Electro+Sonic; ComponentLink11Description: http://datasheet.octopart.com/CRGCQ0402F150R-TE-Connectivity-datasheet-114679081.pdf?src-supplier=Electro+Sonic; ComponentLink12URL: http://datasheet.octopart.com/CRGCQ0402F150R-TE-Connectivity-datasheet-114679081.pdf?src-supplier=Interstate+Connecting+Components; ComponentLink12Description: http://datasheet.octopart.com/CRGCQ0402F150R-TE-Connectivity-datasheet-114679081.pdf?src-supplier=Interstate+Connecting+Components; ComponentLink13URL: http://datasheet.octopart.com/CRGCQ0402F150R-TE-Connectivity-datasheet-114679081.pdf?src-supplier=TME; ComponentLink13Description: http://datasheet.octopart.com/CRGCQ0402F150R-TE-Connectivity-datasheet-114679081.pdf?src-supplier=TME; ComponentLink14URL: http://datasheet.octopart.com/CRGCQ0402F150R-TE-Connectivity-datasheet-114679081.pdf?src-supplier=Sager+Electronics; ComponentLink14Description: http://datasheet.octopart.com/CRGCQ0402F150R-TE-Connectivity-datasheet-114679081.pdf?src-supplier=Sager+Electronics; ComponentLink15URL: https://datasheet.octopart.com/CRGCQ0402F150R-TE-Connectivity-datasheet-114679081.pdf?src-supplier=Master+Electronics; ComponentLink15Description: https://datasheet.octopart.com/CRGCQ0402F150R-TE-Connectivity-datasheet-114679081.pdf?src-supplier=Master+Electronics
footprint Res-0402
pins: 1, 2